# EAGLE library part LILYGO_TTGO (library LilyGO+TTGO+ESP32)
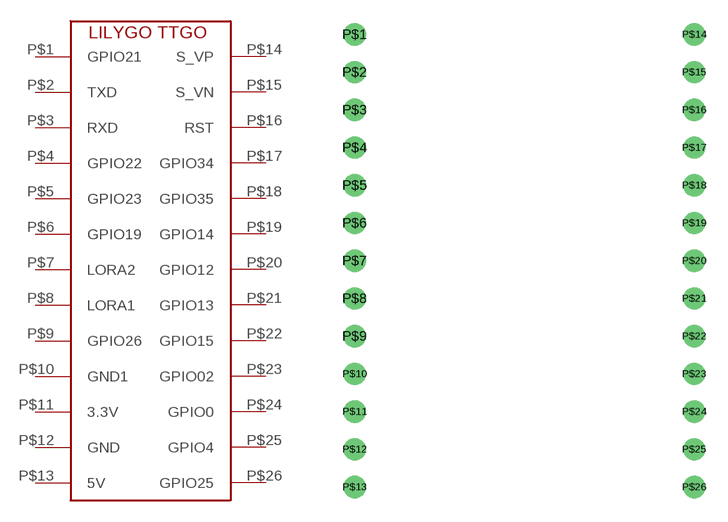
[diagram p0: symbol with the pads of LILTGO_TTGO; footprint LILTGO_TTGO]

Designator prefix -

## LILYGO_TTGO  [LILTGO_TTGO]
P$1  GPIO21
P$2  TXD
P$3  RXD
P$4  GPIO22
P$5  GPIO23
P$6  GPIO19
P$7  LORA2
P$8  LORA1
P$9  GPIO26
P$10  GND1
P$11  3.3V
P$12  GND
P$13  5V
P$14  S_VP
P$15  S_VN
P$16  RST
P$17  GPIO34
P$18  GPIO35
P$19  GPIO14
P$20  GPIO12
P$21  GPIO13
P$22  GPIO15
P$23  GPIO02
P$24  GPIO0
P$25  GPIO4
P$26  GPIO25

## Footprint LILTGO_TTGO (pad centres in mm)
drill 1: P$1 -2.54,16.51; P$2 -2.54,13.97; P$3 -2.54,11.43; P$4 -2.54,8.89; P$5 -2.54,6.35; P$6 -2.54,3.81; P$7 -2.54,1.27; P$8 -2.54,-1.27; P$9 -2.54,-3.81; P$10 -2.54,-6.35; P$11 -2.54,-8.89; P$12 -2.54,-11.43; P$13 -2.54,-13.97; P$14 20.32,16.51; P$15 20.32,13.97; P$16 20.32,11.43; P$17 20.32,8.89; P$18 20.32,6.35; P$19 20.32,3.81; P$20 20.32,1.27; P$21 20.32,-1.27; P$22 20.32,-3.81; P$23 20.32,-6.35; P$24 20.32,-8.89; P$25 20.32,-11.43; P$26 20.32,-13.97